# Altium footprint library 953363-1.PcbLib: 1 footprints
Each footprint in its own frame and in the unit in brackets; x right, y up, seen from the top. Pads: shape width x height; smd on the part's side, far side on the other; paste and mask are expansions set on the pad; w line width, h text height; cw(c..) or ccw(c..) is an arc to the next point about the centre after c.
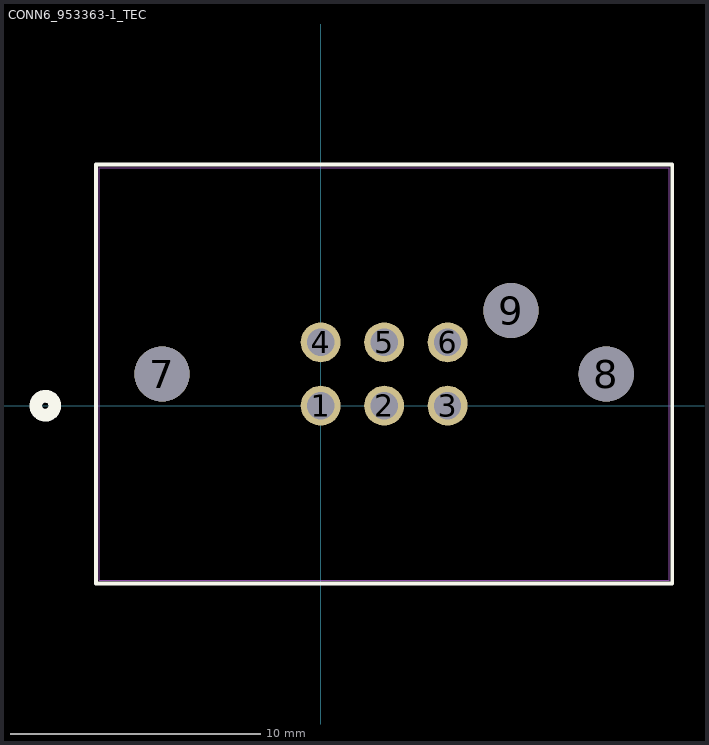
[diagram p0: the footprint, top view; thin cyan lines are the x and y axes]

## CONN6_953363-1_TEC [mil]
pads (9):
  round 63 hole 43 paste-99999 mask+0: 1(0,0) 2(100,0) 3(200,0) 4(0,100) 5(100,100) 6(200,100)
  round 87 hole 87 unplated paste-99999 mask+0: 7(-250,50) 8(450,50) 9(300,150)
Top Overlay:
  circle w20: c-434,0 r15
  lines w6: -354,-280 -354,380 554,380 554,-280 -354,-280
  text ".Designator" at -37.5,25 h50
Bottom Overlay:
  circle w20: c-434,0 r15
Mechanical 13:
  circle w20: c0,0 r15
  lines w1: -349,-275 -349,375 549,375 549,-275 -349,-275
  text ".Designator" at -37.5,25 h50